# Altium schematic symbol library TitansLib.SchLib: 462 symbols (part 22 of 24)
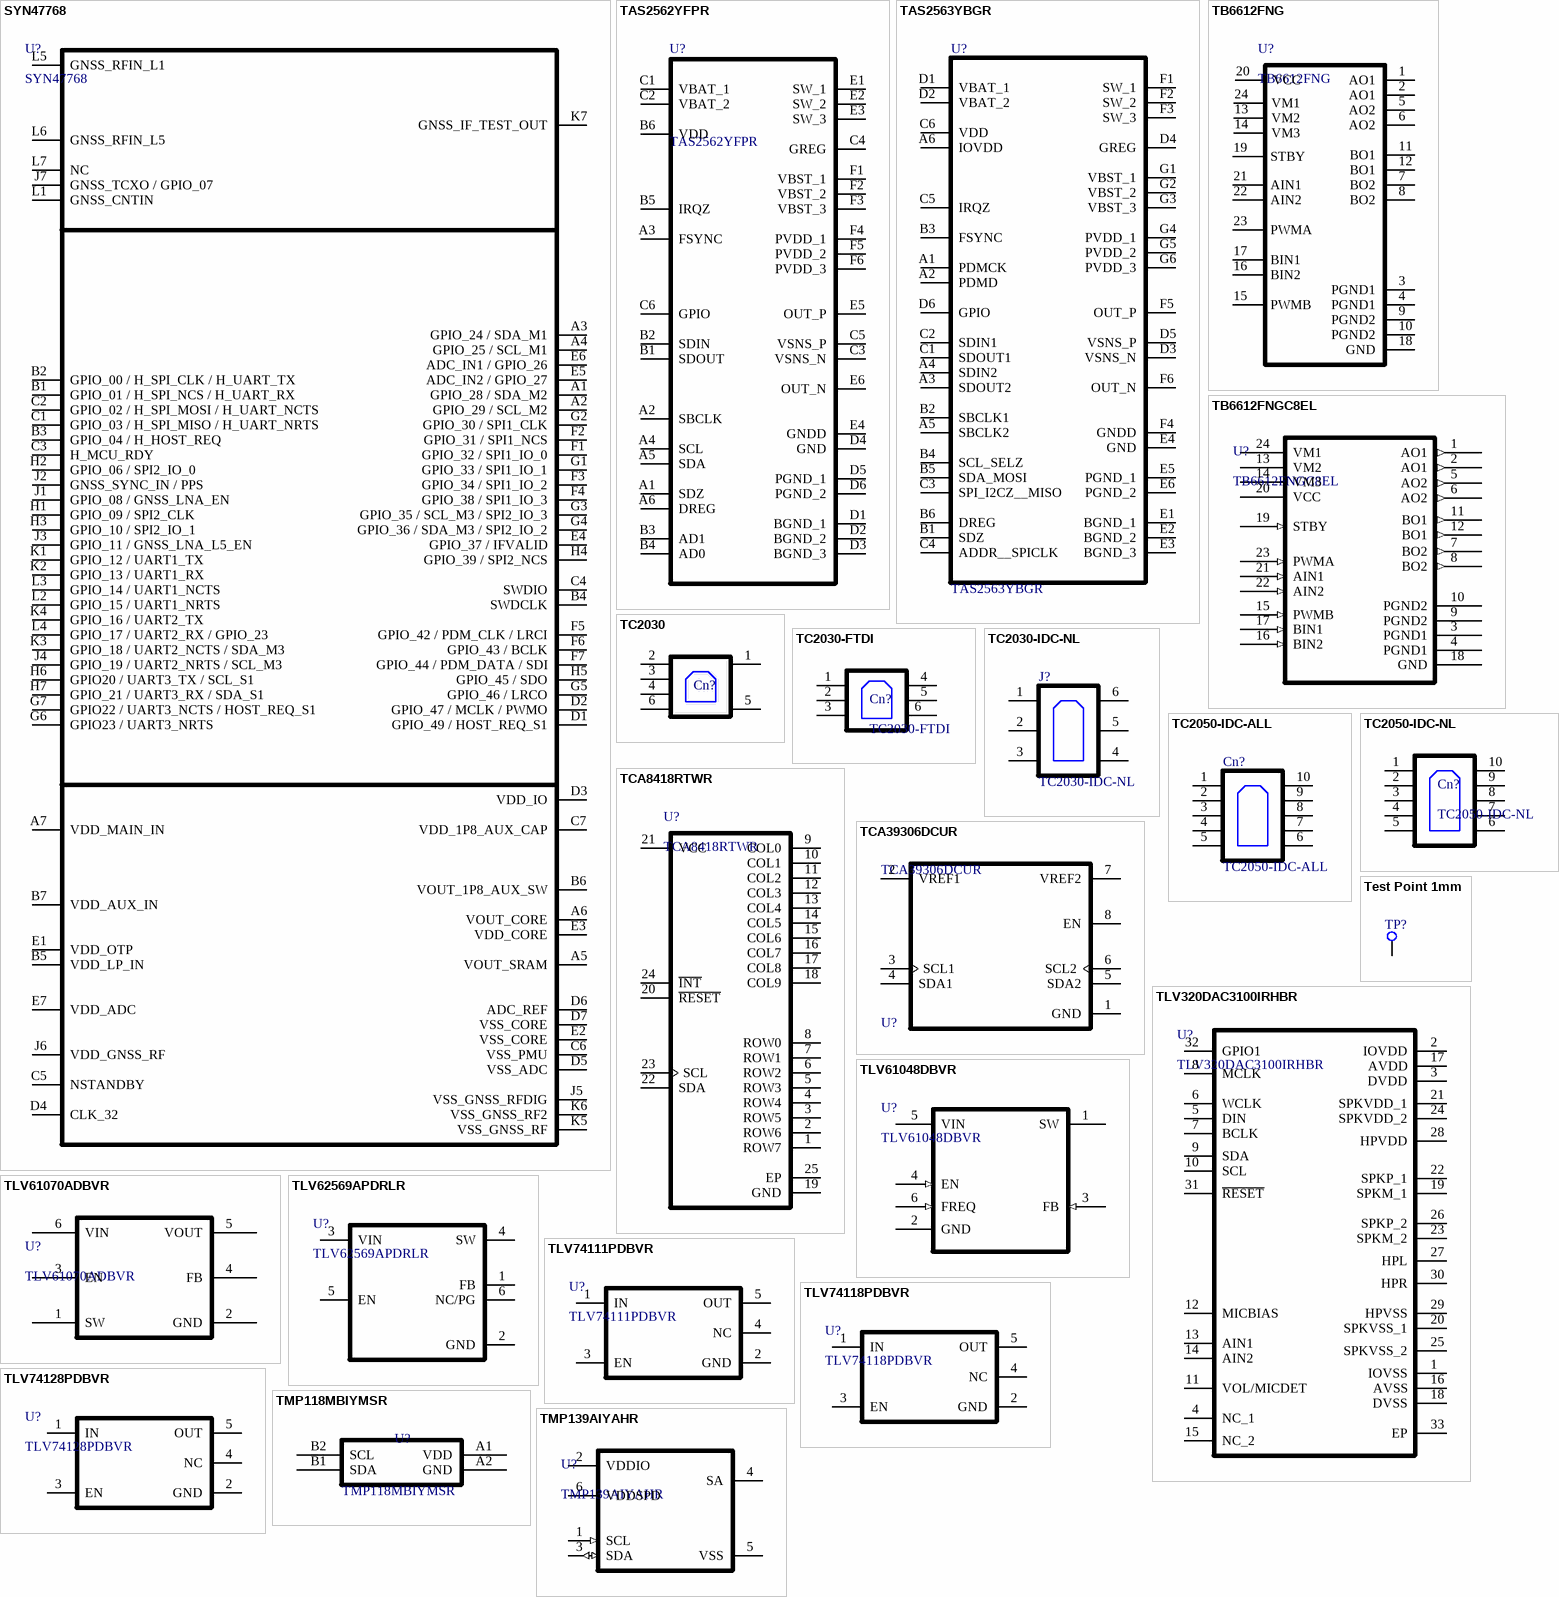
[diagram p38: symbols SYN47768 to TMP139AIYAHR]

## TCA8418RTWR
designator U?
I2C Controlled Keypad Scan IC Serial Interface 24-Pin WQFN EP T/R; Manufacturer: Texas Instruments; Manufacturer Lifecycle Status: ACTIVE; Max Supply Voltage: 3.6V; Min Supply Voltage: 1.65V; Number of Outputs: 18; Supplier: LCSC; Supplier Part Number: C138713; Manufacturer Part Number: TCA8418RTWR; RoHS: Compliant; Category: Integrated Circuits (ICs); Stock: 3191; Pricing: 1=4.4453, 1=0.5291, 1=4.8527, 1=0.6081, 10=3.5432, 10=0.4217, 10=3.868, 10=0.4847, 30=3.0914, 30=0.368, 30=3.3748, 30=0.4229, 100=2.6404, 100=0.3143, 100=2.8824, 100=0.3612, 500=2.3699, 500=0.2821, 500=2.5872, 500=0.3242, 1000=2.234, 1000=0.2659, 1000=2.4387, 1000=0.3056 (CNY); Case/Package: QFN; Contact Plating: Gold; Height: 800µm; Lead Free: Lead Free; Length: 4mm; Lifecycle Status: Production; Max Operating Temperature: 85°C; Min Operating Temperature: -40°C; Pins: 24; Radiation Hardening: No; REACH SVHC: No; Schedule B: 8542390000, 8542390000|8542390000|8542390000|8542390000|8542390000|8542390000|8542390000|8542390000|8542390000|8542390000|8542390000|8542390000|8542390000|8542390000|8542390000|8542390000|8542390000|8542390000|8542390000|8542390000|8542390000|8542390000|8542390000|85; Thickness: 750µm; Type: Integrated Circuit (IC); Width: 4mm; ComponentLink1URL: https://sigma.octopart.com:443/158979639/technical_drawing/Texas-Instruments-TCA8418RTWR.pdf?src-supplier=Texas+Instruments; ComponentLink1Description: https://sigma.octopart.com:443/158979639/technical_drawing/Texas-Instruments-TCA8418RTWR.pdf?src-supplier=Texas+Instruments; ComponentLink3URL: https://octopart.com:443/opatz8j6/c1?t=EcD7_okiRZCYdfQoNxmFteUZDfucer_bbg7ol_h20rBjszXq_UemeR6uGbVFkzhWzI6kXSRL7jiz40zViixA5-m9PLasHY9x8k5UkQzA0iNNHTRXmsO3ZNkl39JV6MUJ5eN-euLJQtJZYtYxv3gE3oAXgN1d2Ivh9afVwIi0hZhH6AMkodeW93IkeIXrn-za-eW0mY1gfijJ_Hvn0OWDctm1iTdMaOYqHvWfDBef945uSeGiabqk1K8LCJ9e5Wfu1WH9AgrkxxzX-U_vZos7pv6_NimNvg_RdgsATdh6EWZIv4e6txISCNLEWGjfFSjBj262rFzGWdnWyVcGz8FscWxpJ_HPUSduW7JGqQzLqCDbUu7LQSUN_TYrM0f8_kmiDvw8CME&src-supplier=Texas+Instruments; ComponentLink3Description: https://octopart.com:443/opatz8j6/c1?t=EcD7_okiRZCYdfQoNxmFteUZDfucer_bbg7ol_h20rBjszXq_UemeR6uGbVFkzhWzI6kXSRL7jiz40zViixA5-m9PLasHY9x8k5UkQzA0iNNHTRXmsO3ZNkl39JV6MUJ5eN-euLJQtJZYtYxv3gE3oAXgN1d2Ivh9afVwIi0hZhH6AMkodeW93IkeIXrn-za-eW0mY1gfijJ_Hvn0OWDctm1iTdMaOYqHvWfDBef945uSeGiabqk1K8LCJ9e5Wfu1WH9AgrkxxzX-U_vZos7pv6_NimNvg_RdgsATdh6EWZIv4e6txISCNLEWGjfFSjBj262rFzGWdnWyVcGz8FscWxpJ_HPUSduW7JGqQzLqCDbUu7LQSUN_TYrM0f8_kmiDvw8CME&src-supplier=Texas+Instruments; ComponentLink4URL: https://datasheet.octopart.com:443/TCA8418RTWR-Texas-Instruments-datasheet-26769754.pdf?src-supplier=Texas+Instruments; ComponentLink4Description: https://datasheet.octopart.com:443/TCA8418RTWR-Texas-Instruments-datasheet-26769754.pdf?src-supplier=Texas+Instruments; ComponentLink5URL: https://datasheet.octopart.com:443/TCA8418RTWR-Texas-Instruments-datasheet-10318952.pdf?src-supplier=Texas+Instruments; ComponentLink5Description: https://datasheet.octopart.com:443/TCA8418RTWR-Texas-Instruments-datasheet-10318952.pdf?src-supplier=Texas+Instruments; ComponentLink6URL: https://sigma.octopart.com:443/49250758/technical_drawing/Texas-Instruments-TCA8418RTWR.pdf?src-supplier=Texas+Instruments; ComponentLink6Description: https://sigma.octopart.com:443/49250758/technical_drawing/Texas-Instruments-TCA8418RTWR.pdf?src-supplier=Texas+Instruments; ComponentLink7URL: https://datasheet.octopart.com:443/TCA8418RTWR-Texas-Instruments-datasheet-27842577.pdf?src-supplier=Farnell; ComponentLink7Description: https://datasheet.octopart.com:443/TCA8418RTWR-Texas-Instruments-datasheet-27842577.pdf?src-supplier=Farnell; ComponentLink8URL: https://datasheet.octopart.com:443/TCA8418RTWR-Texas-Instruments-datasheet-16079866.pdf?src-supplier=element14+APAC; ComponentLink8Description: https://datasheet.octopart.com:443/TCA8418RTWR-Texas-Instruments-datasheet-16079866.pdf?src-supplier=element14+APAC; ComponentLink9URL: https://datasheet.octopart.com:443/TCA8418RTWR-Texas-Instruments-datasheet-62088921.pdf?src-supplier=element14+APAC; ComponentLink9Description: https://datasheet.octopart.com:443/TCA8418RTWR-Texas-Instruments-datasheet-62088921.pdf?src-supplier=element14+APAC; ComponentLink10URL: https://datasheet.octopart.com:443/TCA8418RTWR-Texas-Instruments-datasheet-164418179.pdf?src-supplier=SHENGYU+ELECTRONICS; ComponentLink10Description: https://datasheet.octopart.com:443/TCA8418RTWR-Texas-Instruments-datasheet-164418179.pdf?src-supplier=SHENGYU+ELECTRONICS; ComponentLink11URL: https://datasheet.octopart.com:443/TCA8418RTWR-Texas-Instruments-datasheet-165804537.pdf?src-supplier=LCSC; ComponentLink11Description: https://datasheet.octopart.com:443/TCA8418RTWR-Texas-Instruments-datasheet-165804537.pdf?src-supplier=LCSC; ComponentLink12URL: https://datasheet.octopart.com:443/TCA8418RTWR-Texas-Instruments-datasheet-159117508.pdf?src-supplier=LCSC; ComponentLink12Description: https://datasheet.octopart.com:443/TCA8418RTWR-Texas-Instruments-datasheet-159117508.pdf?src-supplier=LCSC; ComponentLink13URL: https://datasheet.octopart.com:443/TCA8418RTWR-Texas-Instruments-datasheet-137316104.pdf?src-supplier=Future+Electronics; ComponentLink13Description: https://datasheet.octopart.com:443/TCA8418RTWR-Texas-Instruments-datasheet-137316104.pdf?src-supplier=Future+Electronics; ComponentLink14URL: https://datasheet.octopart.com:443/TCA8418RTWR-Texas-Instruments-datasheet-14134936.pdf?src-supplier=iiiC; ComponentLink14Description: https://datasheet.octopart.com:443/TCA8418RTWR-Texas-Instruments-datasheet-14134936.pdf?src-supplier=iiiC; ComponentLink15URL: https://datasheet.octopart.com:443/TCA8418RTWR-Texas-Instruments-datasheet-11968181.pdf?src-supplier=Arrow+Electronics; ComponentLink15Description: https://datasheet.octopart.com:443/TCA8418RTWR-Texas-Instruments-datasheet-11968181.pdf?src-supplier=Arrow+Electronics; ComponentLink16URL: http://sigma.octopart.com:80/conflict_mineral_statement/Texas-Instruments-company-63.pdf?src-supplier=Compliance+Statements; ComponentLink16Description: http://sigma.octopart.com:80/conflict_mineral_statement/Texas-Instruments-company-63.pdf?src-supplier=Compliance+Statements; ComponentLink17URL: http://sigma.octopart.com:80/reach_statement/Texas-Instruments-company-64.pdf?src-supplier=Compliance+Statements; ComponentLink17Description: http://sigma.octopart.com:80/reach_statement/Texas-Instruments-company-64.pdf?src-supplier=Compliance+Statements
footprint TCA8418RTWR (QFN, 24-Leads, Body 4x4mm, Pitch 0.5mm, Thermal Pad 2.45x2.45mm)
pins: 1 ROW7 "GPIO or row 7 in keypad matrix", 2 ROW6 "GPIO or row 6 in keypad matrix", 3 ROW5 "GPIO or row 5 in keypad matrix", 4 ROW4 "GPIO or row 4 in keypad matrix", 5 ROW3 "GPIO or row 3 in keypad matrix", 6 ROW2 "GPIO or row 2 in keypad matrix", 7 ROW1 "GPIO or row 1 in keypad matrix", 8 ROW0 "GPIO or row 0 in keypad matrix", 9 COL0 "GPIO or column 0 in keypad matrix", 10 COL1 "GPIO or column 1 in keypad matrix", 11 COL2 "GPIO or column 2 in keypad matrix", 12 COL3 "GPIO or column 3 in keypad matrix", 13 COL4 "GPIO or column 4 in keypad matrix", 14 COL5 "GPIO or column 5 in keypad matrix", 15 COL6 "GPIO or column 6 in keypad matrix", 16 COL7 "GPIO or column 7 in keypad matrix", 17 COL8 "GPIO or column 8 in keypad matrix", 18 COL9 "GPIO or column 9 in keypad matrix", 19 GND "Ground", 20 ~{RESET} "Active-low reset input. Connect to VCC through a pullup resistor, if no active connection is used.", 21 VCC (power) "Supply voltage of 1.65 V to 3.6 V", 22 SDA "Serial data bus. Connect to VCC through a pullup resistor.", 23 SCL "Serial clock bus. Connect to VCC through a pullup resistor.", 24 ~{INT} "Active-low interrupt output. Open drain structure. Connect to VCC through a pullup resistor.", 25 EP "Exposed Pad"

## TCA39306DCUR
designator U?
FM+ I²C bus and SMBus voltage translator 8-VSSOP -40 to 125; Manufacturer: Texas Instruments; Manufacturer Lifecycle Status: ACTIVE; Frequency: 12.5MHz; Max Junction Temperature (Tj): 150°C; Number of Circuits: 1; Supplier: DigiKey; Supplier Part Number: 296-TCA39306DCURCT-ND; Manufacturer Part Number: TCA39306DCUR; RoHS: Compliant; Category: Voltage Level Shifters; Stock: 10045; Pricing: 1=1.16, 10=0.838, 25=0.758, 100=0.6698, 250=0.62772, 500=0.60236, 1000=0.58146 (USD); Ambient Temperature Range High: 125°C; Case/Package: VSSOP; Height: 900µm; Length: 2.3mm; Lifecycle Status: Production; Max Operating Temperature: 125°C; Min Operating Temperature: -40°C; Pins: 8; Thickness: 850µm; Width: 2mm; ComponentLink1URL: https://sigma.octopart.com:443/167215082/technical_drawing/Texas-Instruments-TCA39306DCUR.pdf?src-supplier=Texas+Instruments; ComponentLink1Description: https://sigma.octopart.com:443/167215082/technical_drawing/Texas-Instruments-TCA39306DCUR.pdf?src-supplier=Texas+Instruments; ComponentLink2URL: https://octopart.com:443/opatz8j6/c1?t=cuJHrWyqA9sXS9OeNBSMVjSZzipewaq_cO1UrxPFxNO9cUi_-3un0wkPJOiVlTn0n0u9VaZOG4aIVrWFOBD3JBTYNH09CnZnJoz02kLV-xwghmLScma3YhGrYa6r7W6HIdqFe6qI44CFTqODpuIKVbTSnKNLxfZmxecu9alQwbm-g96gBpM-ONZMrwHJcp5pkJLENRrjnfRb0QudlzUz4HvFZTwojDYBifx1Jd9V_MtoCkg8kd4tmVesq4SZrk172Lm7SLBO1SsH0PeV2ElZmF9rzKgIFov1hctEUXdHHfKgRXWyp0o4L0ODSekwyi9oVhOnNB07cdPM60V0mj9dIPXTXXasNTJpsEDKALNiRwALk6lsUelmlAnO48yEFuf3CvYAKs67mg&src-supplier=Texas+Instruments; ComponentLink2Description: https://octopart.com:443/opatz8j6/c1?t=cuJHrWyqA9sXS9OeNBSMVjSZzipewaq_cO1UrxPFxNO9cUi_-3un0wkPJOiVlTn0n0u9VaZOG4aIVrWFOBD3JBTYNH09CnZnJoz02kLV-xwghmLScma3YhGrYa6r7W6HIdqFe6qI44CFTqODpuIKVbTSnKNLxfZmxecu9alQwbm-g96gBpM-ONZMrwHJcp5pkJLENRrjnfRb0QudlzUz4HvFZTwojDYBifx1Jd9V_MtoCkg8kd4tmVesq4SZrk172Lm7SLBO1SsH0PeV2ElZmF9rzKgIFov1hctEUXdHHfKgRXWyp0o4L0ODSekwyi9oVhOnNB07cdPM60V0mj9dIPXTXXasNTJpsEDKALNiRwALk6lsUelmlAnO48yEFuf3CvYAKs67mg&src-supplier=Texas+Instruments; ComponentLink3URL: https://datasheet.octopart.com:443/TCA39306DCUR-Texas-Instruments-datasheet-158985309.pdf?src-supplier=Upverter; ComponentLink3Description: https://datasheet.octopart.com:443/TCA39306DCUR-Texas-Instruments-datasheet-158985309.pdf?src-supplier=Upverter; ComponentLink4URL: https://datasheet.octopart.com:443/TCA39306DCUR-Texas-Instruments-datasheet-165811859.pdf?src-supplier=Augswan; ComponentLink4Description: https://datasheet.octopart.com:443/TCA39306DCUR-Texas-Instruments-datasheet-165811859.pdf?src-supplier=Augswan; ComponentLink5URL: https://datasheet.octopart.com:443/TCA39306DCUR-Texas-Instruments-datasheet-166167673.pdf?src-supplier=LCSC; ComponentLink5Description: https://datasheet.octopart.com:443/TCA39306DCUR-Texas-Instruments-datasheet-166167673.pdf?src-supplier=LCSC; ComponentLink6URL: http://sigma.octopart.com:80/reach_statement/Texas-Instruments-company-64.pdf?src-supplier=Compliance+Statements; ComponentLink6Description: http://sigma.octopart.com:80/reach_statement/Texas-Instruments-company-64.pdf?src-supplier=Compliance+Statements; ComponentLink7URL: http://sigma.octopart.com:80/conflict_mineral_statement/Texas-Instruments-company-63.pdf?src-supplier=Compliance+Statements; ComponentLink7Description: http://sigma.octopart.com:80/conflict_mineral_statement/Texas-Instruments-company-63.pdf?src-supplier=Compliance+Statements; Supplier 1: DigiKey; Supplier Part Number 1: 296-TCA39306DCURCT-ND; Supplier 2: DigiKey; Supplier Part Number 2: 296-TCA39306DCURTR-ND; Supplier 3: Mouser; Supplier Part Number 3: 595-TCA39306DCUR
footprint TSSOP50P310X90-8N (TSSOP, 8-Leads, Body 2.00x2.30mm, Pitch 0.50mm, IPC Medium Density)
pins: 1 GND, 2 VREF1, 3 SCL1, 4 SDA1, 5 SDA2, 6 SCL2, 7 VREF2, 8 EN

## Test Point 1mm
designator TP?, comment Test point  (value not drawn)  (no BOM)
Test Point Round SMD D=1mm; Type: Test
footprint TP 1mm
pins: 1

## TLV320DAC3100IRHBR
designator U?
Low-Power Stereo Audio DAC With Audio Processing / and Mono Class-D Speaker Amplifier; Manufacturer_Name: Texas Instruments; Datasheet Link: http://www.ti.com/lit/gpn/TLV320DAC3100; Height: 1mm; Manufacturer Part Number: TLV320DAC3100IRHBR; Mouser Part Number: 595-V320DAC3100IRHBR; Mouser Price/Stock: https://www.mouser.co.uk/ProductDetail/Texas-Instruments/TLV320DAC3100IRHBT?qs=3cDLNOBdYaV9lK%252Bp3rNk4A%3D%3D; Arrow Part Number: TLV320DAC3100IRHBR; Arrow Price/Stock: https://www.arrow.com/en/products/tlv320dac3100irhbt/texas-instruments?utm_currency=USD&region=europe; Supplier 1: DigiKey; Supplier Part Number 1: 296-27216-1-ND; Supplier 2: DigiKey; Supplier Part Number 2: 296-27216-6-ND; Supplier 3: Mouser; Supplier Part Number 3: 595-V320DAC3100IRHBR; Supplier 4: LCSC; Supplier Part Number 4: C179677
footprint QFN50P500X500X100-33N-D
pins: 1 IOVSS, 2 IOVDD, 3 DVDD, 4 NC_1, 5 DIN, 6 WCLK, 7 BCLK, 8 MCLK, 9 SDA, 10 SCL, 11 VOL/MICDET, 12 MICBIAS, 13 AIN1, 14 AIN2, 15 NC_2, 16 AVSS, 17 AVDD, 18 DVSS, 19 SPKM_1, 20 SPKVSS_1, 21 SPKVDD_1, 22 SPKP_1, 23 SPKM_2, 24 SPKVDD_2, 25 SPKVSS_2, 26 SPKP_2, 27 HPL, 28 HPVDD, 29 HPVSS, 30 HPR, 31 ~{RESET}, 32 GPIO1, 33 EP

## TLV61048DBVR
designator U?
Output Voltage Non-synchronous Boost Converterin SOT-23 package; Manufacturer: Texas Instruments; Supplier: Mouser; Supplier Part Number: 595-TLV61048DBVR; Manufacturer Part Number: TLV61048DBVR; RoHS: No; Category: Voltage Regulators - Switching; Stock: 8348; Pricing: 1=0.75, 100 = 0.429, 1000=0.37 (USD); RoHS Compliant: Yes; Supplier 1: DigiKey; Supplier Part Number 1: 296-TLV61048DBVRCT-ND; Supplier 2: DigiKey; Supplier Part Number 2: 296-TLV61048DBVRDKR-ND; Supplier 3: Mouser; Supplier Part Number 3: 595-TLV61048DBVR; Supplier 4: LCSC; Supplier Part Number 4: C2861467
footprint SOT95P275X120-6N (SOT23, 6-Leads, Body 2.90x2.75mm, Pitch 0.95mm, IPC Medium Density)
pins: 1 SW (power), 2 GND (power), 3 FB (in), 4 EN (in), 5 VIN (power), 6 FREQ (in)

## TLV61070ADBVR
designator U?
5-V 2-A boost converter with 0.5-V minimum input voltage 6-SOT-23 -40 to 125; Manufacturer: Texas Instruments; Manufacturer Lifecycle Status: ACTIVE; Number of Channels: 1; Supplier: Arrow Electronics; Supplier Part Number: TLV61070ADBVR; Manufacturer Part Number: TLV61070ADBVR; RoHS: Compliant; Category: Voltage Regulators - Switching; Stock: 1413; Pricing: 1=0,4566, 10=0,3414, 25=0,3062, 100=0,2723, 250=0,2413 (USD); Case/Package: SOT-23; Height: 0m; Length: 2.9mm; Lifecycle Status: Production; Pins: 6; Thickness: 1.2mm; Topology: Boost; Width: 1.6mm; ComponentLink1URL: https://sigma.octopart.com:443/182282880/technical_drawing/Texas-Instruments-TLV61070ADBVR.pdf?src-supplier=Texas+Instruments; ComponentLink1Description: https://sigma.octopart.com:443/182282880/technical_drawing/Texas-Instruments-TLV61070ADBVR.pdf?src-supplier=Texas+Instruments; ComponentLink2URL: https://octopart.com:443/opatz8j6/c1?t=vHjRs84vzqiSD-tO6hMe9JhRTtT3upVDrXCv1wRcZIX6-7MQXDOW7AG681yewBVCNdEFebKssGFTHK-ncVD0g2XIMRfL_MIVj06RM02JHrtUOpniz4ICHh0Z4WKezMRMf0_iOaLkv8UWi4INBJrk-ojIQt6lsV0-UknSvJIBrNevxJaED7KWgn0v9QfrXbVw43Y6droW4axSWNMxhTVfsfd8O4QufXQBbcD7lTo5UdJiQbYbFQVnTcm0nTYllJlextykO5sitRjbvxZTgnwaTVTtXFDEYtQDQ1gxq-RtglKrE_3x7ejlRaBBQqdVbyKumwfqTsNKFt7lXsVPSSWma13VCdsNiNOAl5P2Tp7zQ0DFPACOXbjY72TQtWZtrdD-wOQvHaPHRA&src-supplier=Texas+Instruments; ComponentLink2Description: https://octopart.com:443/opatz8j6/c1?t=vHjRs84vzqiSD-tO6hMe9JhRTtT3upVDrXCv1wRcZIX6-7MQXDOW7AG681yewBVCNdEFebKssGFTHK-ncVD0g2XIMRfL_MIVj06RM02JHrtUOpniz4ICHh0Z4WKezMRMf0_iOaLkv8UWi4INBJrk-ojIQt6lsV0-UknSvJIBrNevxJaED7KWgn0v9QfrXbVw43Y6droW4axSWNMxhTVfsfd8O4QufXQBbcD7lTo5UdJiQbYbFQVnTcm0nTYllJlextykO5sitRjbvxZTgnwaTVTtXFDEYtQDQ1gxq-RtglKrE_3x7ejlRaBBQqdVbyKumwfqTsNKFt7lXsVPSSWma13VCdsNiNOAl5P2Tp7zQ0DFPACOXbjY72TQtWZtrdD-wOQvHaPHRA&src-supplier=Texas+Instruments; ComponentLink3URL: https://sigma.octopart.com:443/179253514/technical_drawing/Texas-Instruments-TLV61070ADBVR.pdf?src-supplier=Texas+Instruments; ComponentLink3Description: https://sigma.octopart.com:443/179253514/technical_drawing/Texas-Instruments-TLV61070ADBVR.pdf?src-supplier=Texas+Instruments; ComponentLink4URL: https://sigma.octopart.com:443/177332312/technical_drawing/Texas-Instruments-TLV61070ADBVR.pdf?src-supplier=Texas+Instruments; ComponentLink4Description: https://sigma.octopart.com:443/177332312/technical_drawing/Texas-Instruments-TLV61070ADBVR.pdf?src-supplier=Texas+Instruments; ComponentLink5URL: https://sigma.octopart.com:443/175570407/technical_drawing/Texas-Instruments-TLV61070ADBVR.pdf?src-supplier=Texas+Instruments; ComponentLink5Description: https://sigma.octopart.com:443/175570407/technical_drawing/Texas-Instruments-TLV61070ADBVR.pdf?src-supplier=Texas+Instruments; ComponentLink6URL: https://sigma.octopart.com:443/154719501/technical_drawing/Texas-Instruments-TLV61070ADBVR.pdf?src-supplier=Texas+Instruments; ComponentLink6Description: https://sigma.octopart.com:443/154719501/technical_drawing/Texas-Instruments-TLV61070ADBVR.pdf?src-supplier=Texas+Instruments; ComponentLink7URL: http://sigma.octopart.com:80/reach_statement/Texas-Instruments-company-64.pdf?src-supplier=Compliance+Statements; ComponentLink7Description: http://sigma.octopart.com:80/reach_statement/Texas-Instruments-company-64.pdf?src-supplier=Compliance+Statements; ComponentLink8URL: http://sigma.octopart.com:80/conflict_mineral_statement/Texas-Instruments-company-63.pdf?src-supplier=Compliance+Statements; ComponentLink8Description: http://sigma.octopart.com:80/conflict_mineral_statement/Texas-Instruments-company-63.pdf?src-supplier=Compliance+Statements; Supplier 1: DigiKey; Supplier Part Number 1: 296-TLV61070ADBVRCT-ND; Supplier 2: DigiKey; Supplier Part Number 2: 296-TLV61070ADBVRDKR-ND; Supplier 3: Mouser; Supplier Part Number 3: 595-TLV61070ADBVR
footprint TLV61070ADBVR (SOT23, 6-Leads, Body 2,90x2,80mm, Pitch 0,95mm, IPC Low Density)
pins: 1 SW, 2 GND, 3 EN, 4 FB, 5 VOUT, 6 VIN

## TLV62569APDRLR
designator U?
Switching Regulator, 2A, 1500kHz Switching Freq-Max, PDSO6; Manufacturer: Texas Instruments; Supplier: Mouser; Supplier Part Number: 595-TLV62569APDRLR; Manufacturer Part Number: TLV62569APDRLR; RoHS: Yes; Category: Voltage Regulators - Switching; Stock: 34810; Pricing: 1=0.21, 10=0.142, 50=0.126, 100=0.108, 1000=0.084, 10000=0.08 (USD); Terminal Finish: Tin; JESD-609 Code: e3; Throw Configuration: SWITCHING REGULATOR; Moisture Sensitivity Level: 1; Peak Reflow Temperature (Cel): 260°C; Reach SVHC Compliant: Yes; RoHS Compliant: Yes; ComponentLink1URL: https://www.ti.com:443/lit/ds/symlink/tlv62568a.pdf?src-supplier=IHS+Markit; ComponentLink1Description: https://www.ti.com:443/lit/ds/symlink/tlv62568a.pdf?src-supplier=IHS+Markit; ComponentLink2URL: http://www.ti.com/lit/ds/symlink/tlv62568a.pdf?src-supplier=Digikey; ComponentLink2Description: http://www.ti.com/lit/ds/symlink/tlv62568a.pdf?src-supplier=Digikey; ComponentLink3URL: http://www.ti.com/general/docs/suppproductinfo.tsp?distId=10&amp;gotoUrl=http%3A%2F%2Fwww.ti.com%2Flit%2Fgpn%2Ftlv62568a&src-supplier=Digikey; ComponentLink3Description: http://www.ti.com/general/docs/suppproductinfo.tsp?distId=10&amp;gotoUrl=http%3A%2F%2Fwww.ti.com%2Flit%2Fgpn%2Ftlv62568a&src-supplier=Digikey; Supplier 1: Digikey; Supplier Part Number 1: 296-51693-1-ND; Supplier 2: Mouser; Supplier Part Number 2: 595-TLV62569APDRLR
footprint SOT50P160X60-6N (SOT23, 6-Leads, Body 1.60x1.60mm, Pitch 0.50mm, IPC Medium Density)
pins: 1 FB, 2 GND, 3 VIN, 4 SW, 5 EN, 6 NC/PG

## TLV74111PDBVR
designator U?
150-mA low-dropout (LDO) voltage regulator with active output discharge and enable 5-SOT-23 -40 to 125; Manufacturer: Texas Instruments; Supplier: DigiKey; Supplier Part Number: 296-51743-1-ND; Manufacturer Part Number: TLV74111PDBVR; RoHS: Compliant; Category: LDO Voltage Regulators; Stock: 14068; Pricing: 1=0.11, 10=0.074, 25=0.0648, 100=0.0546, 250=0.04972, 500=0.04674, 1000=0.0443 (USD); Case/Package: SOT-23; Height: 1.45mm; Length: 2.9mm; Lifecycle Status: Production; Manufacturer Lifecycle Status: ACTIVE; Max Operating Temperature: 125°C; Min Operating Temperature: -40°C; Pins: 5; Schedule B: 8542390000; Thickness: 1.2mm; Width: 1.6mm; ComponentLink1URL: https://sigma.octopart.com:443/177332311/technical_drawing/Texas-Instruments-TLV74111PDBVR.pdf?src-supplier=Texas+Instruments; ComponentLink1Description: https://sigma.octopart.com:443/177332311/technical_drawing/Texas-Instruments-TLV74111PDBVR.pdf?src-supplier=Texas+Instruments; ComponentLink2URL: https://octopart.com:443/opatz8j6/c1?t=BgYGKxNO4uAk70t2o9PA6mQ6vwTlRIT8wfeK4DTGbNF3gqAnuH8pyjo1Zf9aREQKDqWjg_n9s37NPhVM2hQqLkZClATMew16GI07lX0rKNpMfTT5-QNithl_aq5wrjDkd4svBl29YXFc6hdL8nD5dxnjT5yA9TGhVKOcfrLVkJt_qvxn7pkUojwB8qA1pAwmCzovIwuXLWybtGjtXbziZIhUiYxnhkke7qNWpkJzhH-6lb1Y10wwkySMkKyrc7_InYtlR2sy7JDnBczxx8piaphExRoUMX1ngJ9uuEHZnRAqohnGt1zaadu1c3kw9Okjymddr9Tg9x2bwI6I_tj0-9g8gq5lP_2UL4ZivigmCGpCrWLrslF1u9YWUR6MsNea31aTAw&src-supplier=Texas+Instruments; ComponentLink2Description: https://octopart.com:443/opatz8j6/c1?t=BgYGKxNO4uAk70t2o9PA6mQ6vwTlRIT8wfeK4DTGbNF3gqAnuH8pyjo1Zf9aREQKDqWjg_n9s37NPhVM2hQqLkZClATMew16GI07lX0rKNpMfTT5-QNithl_aq5wrjDkd4svBl29YXFc6hdL8nD5dxnjT5yA9TGhVKOcfrLVkJt_qvxn7pkUojwB8qA1pAwmCzovIwuXLWybtGjtXbziZIhUiYxnhkke7qNWpkJzhH-6lb1Y10wwkySMkKyrc7_InYtlR2sy7JDnBczxx8piaphExRoUMX1ngJ9uuEHZnRAqohnGt1zaadu1c3kw9Okjymddr9Tg9x2bwI6I_tj0-9g8gq5lP_2UL4ZivigmCGpCrWLrslF1u9YWUR6MsNea31aTAw&src-supplier=Texas+Instruments; ComponentLink3URL: https://sigma.octopart.com:443/175570406/technical_drawing/Texas-Instruments-TLV74111PDBVR.pdf?src-supplier=Texas+Instruments; ComponentLink3Description: https://sigma.octopart.com:443/175570406/technical_drawing/Texas-Instruments-TLV74111PDBVR.pdf?src-supplier=Texas+Instruments; ComponentLink4URL: https://sigma.octopart.com:443/169406034/technical_drawing/Texas-Instruments-TLV74111PDBVR.pdf?src-supplier=Texas+Instruments; ComponentLink4Description: https://sigma.octopart.com:443/169406034/technical_drawing/Texas-Instruments-TLV74111PDBVR.pdf?src-supplier=Texas+Instruments; ComponentLink5URL: https://sigma.octopart.com:443/155939316/technical_drawing/Texas-Instruments-TLV74111PDBVR.pdf?src-supplier=Texas+Instruments; ComponentLink5Description: https://sigma.octopart.com:443/155939316/technical_drawing/Texas-Instruments-TLV74111PDBVR.pdf?src-supplier=Texas+Instruments; ComponentLink6URL: https://sigma.octopart.com:443/102331370/technical_drawing/Texas-Instruments-TLV74111PDBVR.pdf?src-supplier=Texas+Instruments; ComponentLink6Description: https://sigma.octopart.com:443/102331370/technical_drawing/Texas-Instruments-TLV74111PDBVR.pdf?src-supplier=Texas+Instruments; ComponentLink7URL: https://sigma.octopart.com:443/49249325/technical_drawing/Texas-Instruments-TLV74111PDBVR.pdf?src-supplier=Texas+Instruments; ComponentLink7Description: https://sigma.octopart.com:443/49249325/technical_drawing/Texas-Instruments-TLV74111PDBVR.pdf?src-supplier=Texas+Instruments; ComponentLink8URL: https://datasheet.octopart.com:443/TLV74111PDBVR-Texas-Instruments-datasheet-148780593.pdf?src-supplier=Augswan; ComponentLink8Description: https://datasheet.octopart.com:443/TLV74111PDBVR-Texas-Instruments-datasheet-148780593.pdf?src-supplier=Augswan; ComponentLink9URL: http://sigma.octopart.com:80/reach_statement/Texas-Instruments-company-64.pdf?src-supplier=Compliance+Statements; ComponentLink9Description: http://sigma.octopart.com:80/reach_statement/Texas-Instruments-company-64.pdf?src-supplier=Compliance+Statements; ComponentLink10URL: http://sigma.octopart.com:80/conflict_mineral_statement/Texas-Instruments-company-63.pdf?src-supplier=Compliance+Statements; ComponentLink10Description: http://sigma.octopart.com:80/conflict_mineral_statement/Texas-Instruments-company-63.pdf?src-supplier=Compliance+Statements; Supplier 1: DigiKey; Supplier Part Number 1: 296-51743-1-ND; Supplier 2: DigiKey; Supplier Part Number 2: 296-51743-2-ND; Supplier 3: Mouser; Supplier Part Number 3: 595-TLV74111PDBVR
footprint SOT95P280X145-5N (SOT23, 5-Leads, Body 2.90x2.80mm, Pitch 0.95mm, IPC Medium Density)
pins: 1 IN, 2 GND, 3 EN, 4 NC, 5 OUT

## TLV74118PDBVR
designator U?
150mA null 1.8V positive 5.5V SOT-23-5 Linear Voltage Regulators (LDO) ROHS; Manufacturer: Texas Instruments; Manufacturer Lifecycle Status: ACTIVE; Accuracy: 1%; Dropout Voltage: 230mV; Max Junction Temperature (Tj): 125°C; Min Supply Voltage: 1.4V; Nominal Supply Current: 50µA; Number of Channels: 1; Supplier: DigiKey; Supplier Part Number: 296-48986-1-ND; Manufacturer Part Number: TLV74118PDBVR; RoHS: Compliant; Category: LDO Voltage Regulators; Stock: 34456; Pricing: 1=0.12, 10=0.082, 25=0.0716, 100=0.0602, 250=0.05484, 500=0.05162, 1000=0.04896 (USD); Case/Package: SOT-23; Height: 1.45mm; Length: 2.9mm; Lifecycle Status: Production; Max Operating Temperature: 125°C; Max Supply Voltage: 5.5V; Min Operating Temperature: -40°C; Number of Outputs: 1; Pins: 5; Output Current: 150mA; Output Voltage: 1.8V; Schedule B: 8542390000, 8542390000|8542390000, 8542390000|8542390000|8542390000, 8542390000|8542390000|8542390000|8542390000; Thickness: 1.2mm; Width: 1.6mm; ComponentLink1URL: https://sigma.octopart.com:443/177332311/technical_drawing/Texas-Instruments-TLV74118PDBVR.pdf?src-supplier=Texas+Instruments; ComponentLink1Description: https://sigma.octopart.com:443/177332311/technical_drawing/Texas-Instruments-TLV74118PDBVR.pdf?src-supplier=Texas+Instruments; ComponentLink2URL: https://octopart.com:443/opatz8j6/c1?t=GHFjmwm-hBsFimlxZNr1Dpgx77D_Vddh5rGLRfvg7lk55-JUa57oLl3WgxdFJjdNvRujLY1e0HDb0cJWH5Ijd15kMwb1ykXnt4sRDG8O6e6TYZCQgDDco6Tb-xaGEXDg9fHOvdm1hzuOT7oI1UoPrEt4TTMAHlsXGanPtJnx6njPc-rk36vBLK9JuRQw1DYtYvrq7rsVUiGPwxbf0W-5W6EbVUmzQ51p8vGENBgzp9mFAtdO0TJdI-4tWac_OT1ZipEQPuS9E3xwfYQxTMho5DMLeBV70NLOLcXTUQ-mGPLMEJVApxQvQnfkSMSUbzb1g5Rm3TyY_fGvViFzSTpdW7ALM6TpPgk67BCW5T2AyvOI9nSnGryl2N7Fqkw868LqZt_-JA&src-supplier=Texas+Instruments; ComponentLink2Description: https://octopart.com:443/opatz8j6/c1?t=GHFjmwm-hBsFimlxZNr1Dpgx77D_Vddh5rGLRfvg7lk55-JUa57oLl3WgxdFJjdNvRujLY1e0HDb0cJWH5Ijd15kMwb1ykXnt4sRDG8O6e6TYZCQgDDco6Tb-xaGEXDg9fHOvdm1hzuOT7oI1UoPrEt4TTMAHlsXGanPtJnx6njPc-rk36vBLK9JuRQw1DYtYvrq7rsVUiGPwxbf0W-5W6EbVUmzQ51p8vGENBgzp9mFAtdO0TJdI-4tWac_OT1ZipEQPuS9E3xwfYQxTMho5DMLeBV70NLOLcXTUQ-mGPLMEJVApxQvQnfkSMSUbzb1g5Rm3TyY_fGvViFzSTpdW7ALM6TpPgk67BCW5T2AyvOI9nSnGryl2N7Fqkw868LqZt_-JA&src-supplier=Texas+Instruments; ComponentLink3URL: https://sigma.octopart.com:443/175570406/technical_drawing/Texas-Instruments-TLV74118PDBVR.pdf?src-supplier=Texas+Instruments; ComponentLink3Description: https://sigma.octopart.com:443/175570406/technical_drawing/Texas-Instruments-TLV74118PDBVR.pdf?src-supplier=Texas+Instruments; ComponentLink4URL: https://sigma.octopart.com:443/169406034/technical_drawing/Texas-Instruments-TLV74118PDBVR.pdf?src-supplier=Texas+Instruments; ComponentLink4Description: https://sigma.octopart.com:443/169406034/technical_drawing/Texas-Instruments-TLV74118PDBVR.pdf?src-supplier=Texas+Instruments; ComponentLink5URL: https://sigma.octopart.com:443/155939316/technical_drawing/Texas-Instruments-TLV74118PDBVR.pdf?src-supplier=Texas+Instruments; ComponentLink5Description: https://sigma.octopart.com:443/155939316/technical_drawing/Texas-Instruments-TLV74118PDBVR.pdf?src-supplier=Texas+Instruments; ComponentLink6URL: https://sigma.octopart.com:443/102331370/technical_drawing/Texas-Instruments-TLV74118PDBVR.pdf?src-supplier=Texas+Instruments; ComponentLink6Description: https://sigma.octopart.com:443/102331370/technical_drawing/Texas-Instruments-TLV74118PDBVR.pdf?src-supplier=Texas+Instruments; ComponentLink7URL: https://sigma.octopart.com:443/49249325/technical_drawing/Texas-Instruments-TLV74118PDBVR.pdf?src-supplier=Texas+Instruments; ComponentLink7Description: https://sigma.octopart.com:443/49249325/technical_drawing/Texas-Instruments-TLV74118PDBVR.pdf?src-supplier=Texas+Instruments; ComponentLink8URL: https://datasheet.octopart.com:443/TLV74118PDBVR-Texas-Instruments-datasheet-150595086.pdf?src-supplier=Upverter; ComponentLink8Description: https://datasheet.octopart.com:443/TLV74118PDBVR-Texas-Instruments-datasheet-150595086.pdf?src-supplier=Upverter; ComponentLink9URL: https://datasheet.octopart.com:443/TLV74118PDBVR-Texas-Instruments-datasheet-148780593.pdf?src-supplier=Augswan; ComponentLink9Description: https://datasheet.octopart.com:443/TLV74118PDBVR-Texas-Instruments-datasheet-148780593.pdf?src-supplier=Augswan; ComponentLink10URL: http://sigma.octopart.com:80/reach_statement/Texas-Instruments-company-64.pdf?src-supplier=Compliance+Statements; ComponentLink10Description: http://sigma.octopart.com:80/reach_statement/Texas-Instruments-company-64.pdf?src-supplier=Compliance+Statements; ComponentLink11URL: http://sigma.octopart.com:80/conflict_mineral_statement/Texas-Instruments-company-63.pdf?src-supplier=Compliance+Statements; ComponentLink11Description: http://sigma.octopart.com:80/conflict_mineral_statement/Texas-Instruments-company-63.pdf?src-supplier=Compliance+Statements; Supplier 1: DigiKey; Supplier Part Number 1: 296-48986-1-ND; Supplier 2: DigiKey; Supplier Part Number 2: 296-48986-2-ND; Supplier 3: Mouser; Supplier Part Number 3: 595-TLV74118PDBVR
footprint SOT95P280X145-5N (SOT23, 5-Leads, Body 2.90x2.80mm, Pitch 0.95mm, IPC Medium Density)
pins: 1 IN, 2 GND, 3 EN, 4 NC, 5 OUT

## TLV74128PDBVR
designator U?
150mA null 2.8V positive 5.5V SOT-23-5 Linear Voltage Regulators (LDO) ROHS; Manufacturer: Texas Instruments; Manufacturer Lifecycle Status: ACTIVE; Supplier: DigiKey; Supplier Part Number: 296-51752-1-ND; Manufacturer Part Number: TLV74128PDBVR; RoHS: Compliant; Category: LDO Voltage Regulators; Stock: 8489; Pricing: 1=0.12, 10=0.079, 25=0.0692, 100=0.0583, 250=0.05312, 500=0.05, 1000=0.04741 (USD); Case/Package: SOT-23; Height: 1.45mm; Length: 2.9mm; Lifecycle Status: Production; Max Operating Temperature: 125°C; Min Operating Temperature: -40°C; Pins: 5; Schedule B: 8542390000, 8542390000|8542390000, 8542390000|8542390000|8542390000, 8542390000|8542390000|8542390000|8542390000; Thickness: 1.2mm; Width: 1.6mm; ComponentLink1URL: https://sigma.octopart.com:443/177332311/technical_drawing/Texas-Instruments-TLV74128PDBVR.pdf?src-supplier=Texas+Instruments; ComponentLink1Description: https://sigma.octopart.com:443/177332311/technical_drawing/Texas-Instruments-TLV74128PDBVR.pdf?src-supplier=Texas+Instruments; ComponentLink2URL: https://octopart.com:443/opatz8j6/c1?t=Jij7982ExFCelQgnMgIcz_oOVIBSGhuxNL5XR0gLON9AcVmlENihcu8nCGypNmMKnIgZGgTdLl2tfACsQut9QZzTc7-2i0sYMlE_RZNFCdM5xTDHD-gzgPXVfQisUEavCszK9i6TF020qtVo8jfdJUNpN0WjdxInf68FIKmJPvCFKNQMCvogG-XSDkFTCB6qpBNUZxVG1_k019CGzrsOYQyGU4EBagbE4BSiYeWVsipiBM5PpbF9LZr2M0JW1cx5d4SjJ8Mf9390e5VRZZ7g9K_fOnflhWOh-Aa2b0R-7aWmKJyJDzUBmjo9Q-6fhZRbyx4VJEQwn82KhDNa_XofLbtz8d5kra26Av7rpqkfY3VmDc1pKRmkpzIyF-Lr67lumupeAwk&src-supplier=Texas+Instruments; ComponentLink2Description: https://octopart.com:443/opatz8j6/c1?t=Jij7982ExFCelQgnMgIcz_oOVIBSGhuxNL5XR0gLON9AcVmlENihcu8nCGypNmMKnIgZGgTdLl2tfACsQut9QZzTc7-2i0sYMlE_RZNFCdM5xTDHD-gzgPXVfQisUEavCszK9i6TF020qtVo8jfdJUNpN0WjdxInf68FIKmJPvCFKNQMCvogG-XSDkFTCB6qpBNUZxVG1_k019CGzrsOYQyGU4EBagbE4BSiYeWVsipiBM5PpbF9LZr2M0JW1cx5d4SjJ8Mf9390e5VRZZ7g9K_fOnflhWOh-Aa2b0R-7aWmKJyJDzUBmjo9Q-6fhZRbyx4VJEQwn82KhDNa_XofLbtz8d5kra26Av7rpqkfY3VmDc1pKRmkpzIyF-Lr67lumupeAwk&src-supplier=Texas+Instruments; ComponentLink3URL: https://sigma.octopart.com:443/175570406/technical_drawing/Texas-Instruments-TLV74128PDBVR.pdf?src-supplier=Texas+Instruments; ComponentLink3Description: https://sigma.octopart.com:443/175570406/technical_drawing/Texas-Instruments-TLV74128PDBVR.pdf?src-supplier=Texas+Instruments; ComponentLink4URL: https://sigma.octopart.com:443/169406034/technical_drawing/Texas-Instruments-TLV74128PDBVR.pdf?src-supplier=Texas+Instruments; ComponentLink4Description: https://sigma.octopart.com:443/169406034/technical_drawing/Texas-Instruments-TLV74128PDBVR.pdf?src-supplier=Texas+Instruments; ComponentLink5URL: https://sigma.octopart.com:443/155939316/technical_drawing/Texas-Instruments-TLV74128PDBVR.pdf?src-supplier=Texas+Instruments; ComponentLink5Description: https://sigma.octopart.com:443/155939316/technical_drawing/Texas-Instruments-TLV74128PDBVR.pdf?src-supplier=Texas+Instruments; ComponentLink6URL: https://sigma.octopart.com:443/102331370/technical_drawing/Texas-Instruments-TLV74128PDBVR.pdf?src-supplier=Texas+Instruments; ComponentLink6Description: https://sigma.octopart.com:443/102331370/technical_drawing/Texas-Instruments-TLV74128PDBVR.pdf?src-supplier=Texas+Instruments; ComponentLink7URL: https://sigma.octopart.com:443/49249325/technical_drawing/Texas-Instruments-TLV74128PDBVR.pdf?src-supplier=Texas+Instruments; ComponentLink7Description: https://sigma.octopart.com:443/49249325/technical_drawing/Texas-Instruments-TLV74128PDBVR.pdf?src-supplier=Texas+Instruments; ComponentLink8URL: https://datasheet.octopart.com:443/TLV74128PDBVR-Texas-Instruments-datasheet-159117833.pdf?src-supplier=LCSC; ComponentLink8Description: https://datasheet.octopart.com:443/TLV74128PDBVR-Texas-Instruments-datasheet-159117833.pdf?src-supplier=LCSC; ComponentLink9URL: https://datasheet.octopart.com:443/TLV74128PDBVR-Texas-Instruments-datasheet-148780593.pdf?src-supplier=Augswan; ComponentLink9Description: https://datasheet.octopart.com:443/TLV74128PDBVR-Texas-Instruments-datasheet-148780593.pdf?src-supplier=Augswan; ComponentLink10URL: http://sigma.octopart.com:80/reach_statement/Texas-Instruments-company-64.pdf?src-supplier=Compliance+Statements; ComponentLink10Description: http://sigma.octopart.com:80/reach_statement/Texas-Instruments-company-64.pdf?src-supplier=Compliance+Statements; ComponentLink11URL: http://sigma.octopart.com:80/conflict_mineral_statement/Texas-Instruments-company-63.pdf?src-supplier=Compliance+Statements; ComponentLink11Description: http://sigma.octopart.com:80/conflict_mineral_statement/Texas-Instruments-company-63.pdf?src-supplier=Compliance+Statements; Supplier 1: DigiKey; Supplier Part Number 1: 296-51752-1-ND; Supplier 2: DigiKey; Supplier Part Number 2: 296-51752-2-ND; Supplier 3: Mouser; Supplier Part Number 3: 595-TLV74128PDBVR
footprint SOT95P280X145-5N (SOT23, 5-Leads, Body 2.90x2.80mm, Pitch 0.95mm, IPC Medium Density)
pins: 1 IN, 2 GND, 3 EN, 4 NC, 5 OUT

## TMP118MBIYMSR
designator U?  Manufacturer Part Number: TMP118MBIYMSR  (hidden comment: *)
0.1¡ãC accurate, ultrasmall (0.336mm2) thin (240¦Ìm) I2C digital temperature sensor; Manufacturer: Texas Instruments; Manufacturer Lifecycle Status: ACTIVE; Interface: I2C, SMBus; Supplier: DigiKey; Supplier Part Number: 296-TMP118MBIYMSRCT-ND; RoHS: Compliant; Category: Temperature and Humidity Sensors; Stock: 17618; Pricing: 1=1.13, 5=0.998, 10=0.948, 25=0.8884, 50=0.848, 100=0.8108, 500=0.73622, 1000=0.70849, 5000=0.65269 (USD); Height: 0m; Length: 760µm; Lifecycle Status: Production; Pins: 4; Thickness: 100µm; Width: 760µm; ComponentLink1URL: https://octopart.com:443/opatz8j6/c1?t=Khy7FrBwm6YTBViIx7Qg6EqMp-uAG7rt8yAuBBT5ccPcMhQCegr8Y7d4mEWjDyvTro9ZqfSXpgVg0LBg6xM_oGkkgXs7n2G7LzjvE6SohQCElb-B7FKgkiqIC2WwwLHe95wvcziY5mSpyXwZH0By_qkIKgO8Qp9ic3cP-Tbc70QiT7j7QqvcgJdqyaPnkwvEp3R-zv4vjHDahrWSZqele5I8hLDh1Z5_AZEhfHT_n2mG9eVczB9Uy-qEe7IgMahPBHwVUmHBggE0kk_Dd7rOJ7uZ7QI_ks9ejWgSOb6-5gEVPjrDyB9o7aQw3G_1tQ50frusDngPFzk7X29GC22zWGBSAaBSQg6976yuyZo9cYjmoqrkTrg3Rd5dEG5V4_5FSWJtRw&src-supplier=Texas+Instruments; ComponentLink1Description: https://octopart.com:443/opatz8j6/c1?t=Khy7FrBwm6YTBViIx7Qg6EqMp-uAG7rt8yAuBBT5ccPcMhQCegr8Y7d4mEWjDyvTro9ZqfSXpgVg0LBg6xM_oGkkgXs7n2G7LzjvE6SohQCElb-B7FKgkiqIC2WwwLHe95wvcziY5mSpyXwZH0By_qkIKgO8Qp9ic3cP-Tbc70QiT7j7QqvcgJdqyaPnkwvEp3R-zv4vjHDahrWSZqele5I8hLDh1Z5_AZEhfHT_n2mG9eVczB9Uy-qEe7IgMahPBHwVUmHBggE0kk_Dd7rOJ7uZ7QI_ks9ejWgSOb6-5gEVPjrDyB9o7aQw3G_1tQ50frusDngPFzk7X29GC22zWGBSAaBSQg6976yuyZo9cYjmoqrkTrg3Rd5dEG5V4_5FSWJtRw&src-supplier=Texas+Instruments; ComponentLink2URL: https://datasheet.octopart.com:443/TMP118MBIYMSR-Texas-Instruments-datasheet-190364754.pdf?src-supplier=LCSC; ComponentLink2Description: https://datasheet.octopart.com:443/TMP118MBIYMSR-Texas-Instruments-datasheet-190364754.pdf?src-supplier=LCSC; ComponentLink3URL: http://sigma.octopart.com:80/reach_statement/Texas-Instruments-company-64.pdf?src-supplier=Compliance+Statements; ComponentLink3Description: http://sigma.octopart.com:80/reach_statement/Texas-Instruments-company-64.pdf?src-supplier=Compliance+Statements; ComponentLink4URL: http://sigma.octopart.com:80/conflict_mineral_statement/Texas-Instruments-company-63.pdf?src-supplier=Compliance+Statements; ComponentLink4Description: http://sigma.octopart.com:80/conflict_mineral_statement/Texas-Instruments-company-63.pdf?src-supplier=Compliance+Statements
pins: A1 VDD, A2 GND, B1 SDA, B2 SCL

## TMP139AIYAHR
designator U?
JEDEC DDR5 temperature sensor with 0.5 <strong>&deg;</strong>C accuracy 6-DSBGA -40 to 125; Manufacturer_Name: Texas Instruments; TYPE: TYPE; RefDes: RefDes; Copyright: Copyright (C) 2026 Ultra Librarian. All rights reserved.; Manufacturer_Part_Number: TMP139AIYAHR; Datasheet: https://www.ti.com/lit/gpn/tmp139; Supplier 1: DigiKey; Supplier Part Number 1: 296-TMP139AIYAHRTR-ND; Supplier 2: Mouser; Supplier Part Number 2: 595-TMP139AIYAHR
footprint YAH0006-IPC_A
footprint TMP139AIYAHR (BGA, 6-Leads, Body 0,83x1,33mmx0,40mm, Pitch 0,50mm)
pins: 1 SCL (in), 2 VDDIO (power), 3 SDA (io), 4 SA, 5 VSS (power), 6 VDDSPD (power)

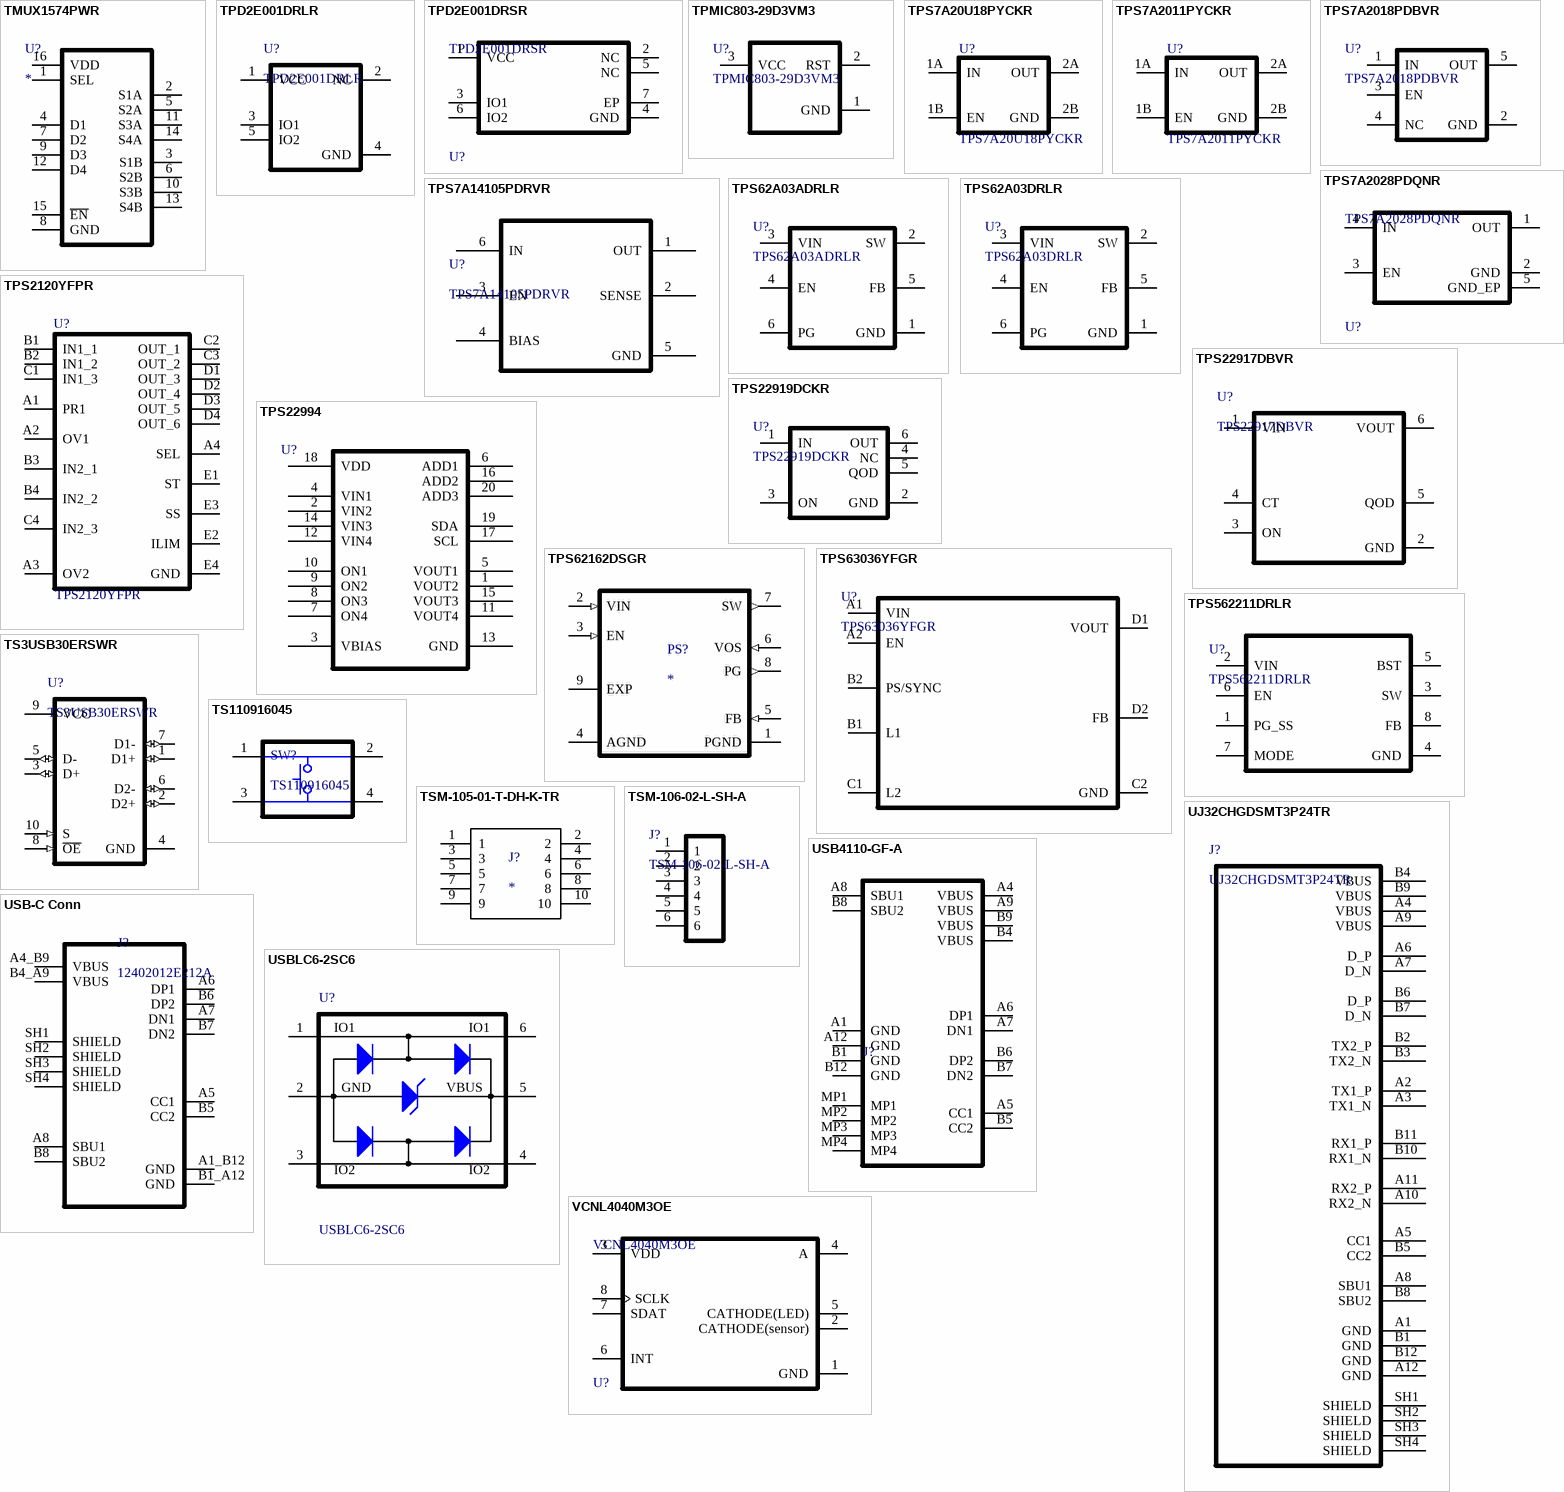
[diagram p16: symbols TMUX1574PWR to VCNL4040M3OE]

## TMUX1574PWR
designator U?
4 Circuit IC Switch 2:1 4.5Ohm 16-TSSOP; Manufacture 1: Texas Instruments; Manufacturer Part Number 1: TMUX1574PWR; Datasheet: http://www.ti.com/lit/ds/symlink/tmux1574.pdf; Height: 1.2mm; Supplier Part Number 1: 296-53444-2-ND; Supplier 1: DigiKey; Supplier Link 1: https://www.digikey.com/en/products/detail/texas-instruments/TMUX1574PWR/9954224; Supplier Unit Price 1: 0.59
footprint SOP65P640X120-16N
pins: 1 SEL, 2 S1A, 3 S1B, 4 D1, 5 S2A, 6 S2B, 7 D2, 8 GND, 9 D3, 10 S3B, 11 S3A, 12 D4, 13 S4B, 14 S4A, 15 ~{EN}, 16 VDD

## TPD2E001DRLR
designator U?
11V Unidirectional 5.5V SOT-553-5 ESD and Surge Protection (TVS/ESD) ROHS; Manufacturer: Texas Instruments; Manufacturer Lifecycle Status: ACTIVE; Value: 1.5pF; Clamping Voltage: 105.5V; Element Configuration: Dual; Interface: Ethernet, LVDS; Leakage Current: 1nA; Max Junction Temperature (Tj): 150°C; Min Supply Voltage: 900mV; Number of Bidirectional Channels: 2; Peak Pulse Current: 10A; Power Line Protection: Yes; Supplier: DigiKey; Supplier Part Number: 296-21883-1-ND; Manufacturer Part Number: TPD2E001DRLR; RoHS: Compliant; Category: ESD and Circuit Protection ICs; Stock: 62032; Pricing: 1=0.82, 10=0.509, 100=0.3282, 500=0.25084 (USD); Ambient Temperature Range High: 85°C; Breakdown Voltage: 11V; Case/Package: SOT; Contact Plating: Gold; Depth: 1.2mm; Direction: Unidirectional; Height: 0m; Lead Free: Lead Free; Length: 1.6mm; Lifecycle Status: Production; Max Operating Temperature: 85°C; Max Supply Voltage: 5.5V; Min Breakdown Voltage: 11V; Min Operating Temperature: -40°C; Number of Channels: 2; Number of Outputs: 2; Pins: 5; Operating Supply Voltage: 5.5V; Polarity: Unidirectional; Radiation Hardening: No; REACH SVHC: No; Reverse Standoff Voltage: 5.5V; Schedule B: 8541100080, 8541100080|8541100080|8541100080|8541100080|8541100080; Termination: SMD/SMT; Thickness: 550µm; Weight: 2.806603mg; Width: 1.2mm; Working Voltage: 5.5V; ComponentLink1URL: https://sigma.octopart.com:443/181443230/technical_drawing/Texas-Instruments-TPD2E001DRLR.pdf?src-supplier=Texas+Instruments; ComponentLink1Description: https://sigma.octopart.com:443/181443230/technical_drawing/Texas-Instruments-TPD2E001DRLR.pdf?src-supplier=Texas+Instruments; ComponentLink2URL: https://octopart.com:443/opatz8j6/c1?t=ItN28SACpDNaP6HBEQm9Q6iVIt4oOF6YLOgBzZeCiwvEW_v_QYTPutJK6__fWoeZM6G1DT60v_-IXP3JVS72uhxnvMguCGn0racWgVh19esynQfxpf5CW46pUG8JqQgukkt0l9b7eU5rTdf3HZ9YTrXIQjvngXBJISGPvf5LDykmGeZY8JDCz6c34SOZDGLUAdR9u3P677q11hspcTMPA8V2BRW-96r2HZo9LIJ4kVXkF5gZM-P0We6u1Y09VRxHq3vMVBBIw3CeaSPqRMKkazsV-sR2O3CLBIcnSg1r3kpnOgOkzEwlpSKtKyCHkhrsnFvYWWDBXsu8y-NBJaecBt5UAxoCQh_XzledbSTpShL4tHLtn6Ps0GNSKtwQ-OvKN5bUmfA&src-supplier=Texas+Instruments; ComponentLink2Description: https://octopart.com:443/opatz8j6/c1?t=ItN28SACpDNaP6HBEQm9Q6iVIt4oOF6YLOgBzZeCiwvEW_v_QYTPutJK6__fWoeZM6G1DT60v_-IXP3JVS72uhxnvMguCGn0racWgVh19esynQfxpf5CW46pUG8JqQgukkt0l9b7eU5rTdf3HZ9YTrXIQjvngXBJISGPvf5LDykmGeZY8JDCz6c34SOZDGLUAdR9u3P677q11hspcTMPA8V2BRW-96r2HZo9LIJ4kVXkF5gZM-P0We6u1Y09VRxHq3vMVBBIw3CeaSPqRMKkazsV-sR2O3CLBIcnSg1r3kpnOgOkzEwlpSKtKyCHkhrsnFvYWWDBXsu8y-NBJaecBt5UAxoCQh_XzledbSTpShL4tHLtn6Ps0GNSKtwQ-OvKN5bUmfA&src-supplier=Texas+Instruments; ComponentLink3URL: https://datasheet.octopart.com:443/TPD2E001DRLR-Texas-Instruments-datasheet-37738713.pdf?src-supplier=Texas+Instruments; ComponentLink3Description: https://datasheet.octopart.com:443/TPD2E001DRLR-Texas-Instruments-datasheet-37738713.pdf?src-supplier=Texas+Instruments; ComponentLink4URL: https://sigma.octopart.com:443/178868977/technical_drawing/Texas-Instruments-TPD2E001DRLR.pdf?src-supplier=Texas+Instruments; ComponentLink4Description: https://sigma.octopart.com:443/178868977/technical_drawing/Texas-Instruments-TPD2E001DRLR.pdf?src-supplier=Texas+Instruments; ComponentLink5URL: https://sigma.octopart.com:443/149978402/technical_drawing/Texas-Instruments-TPD2E001DRLR.pdf?src-supplier=Texas+Instruments; ComponentLink5Description: https://sigma.octopart.com:443/149978402/technical_drawing/Texas-Instruments-TPD2E001DRLR.pdf?src-supplier=Texas+Instruments; ComponentLink6URL: https://datasheet.octopart.com:443/TPD2E001DRLR-Texas-Instruments-datasheet-21096186.pdf?src-supplier=Texas+Instruments; ComponentLink6Description: https://datasheet.octopart.com:443/TPD2E001DRLR-Texas-Instruments-datasheet-21096186.pdf?src-supplier=Texas+Instruments; ComponentLink7URL: https://datasheet.octopart.com:443/TPD2E001DRLR-Texas-Instruments-datasheet-10824604.pdf?src-supplier=Texas+Instruments; ComponentLink7Description: https://datasheet.octopart.com:443/TPD2E001DRLR-Texas-Instruments-datasheet-10824604.pdf?src-supplier=Texas+Instruments; ComponentLink8URL: https://datasheet.octopart.com:443/TPD2E001DRLR-Texas-Instruments-datasheet-10670688.pdf?src-supplier=Texas+Instruments; ComponentLink8Description: https://datasheet.octopart.com:443/TPD2E001DRLR-Texas-Instruments-datasheet-10670688.pdf?src-supplier=Texas+Instruments; ComponentLink9URL: https://datasheet.octopart.com:443/TPD2E001DRLR-Texas-Instruments-datasheet-10258578.pdf?src-supplier=Texas+Instruments; ComponentLink9Description: https://datasheet.octopart.com:443/TPD2E001DRLR-Texas-Instruments-datasheet-10258578.pdf?src-supplier=Texas+Instruments; ComponentLink10URL: https://datasheet.octopart.com:443/TPD2E001DRLR-Texas-Instruments-datasheet-153022.pdf?src-supplier=Texas+Instruments; ComponentLink10Description: https://datasheet.octopart.com:443/TPD2E001DRLR-Texas-Instruments-datasheet-153022.pdf?src-supplier=Texas+Instruments; ComponentLink11URL: https://sigma.octopart.com:443/49249896/technical_drawing/Texas-Instruments-TPD2E001DRLR.pdf?src-supplier=Texas+Instruments; ComponentLink11Description: https://sigma.octopart.com:443/49249896/technical_drawing/Texas-Instruments-TPD2E001DRLR.pdf?src-supplier=Texas+Instruments; ComponentLink12URL: https://datasheet.octopart.com:443/TPD2E001DRLR-Texas-Instruments-datasheet-32015767.pdf?src-supplier=Farnell; ComponentLink12Description: https://datasheet.octopart.com:443/TPD2E001DRLR-Texas-Instruments-datasheet-32015767.pdf?src-supplier=Farnell; ComponentLink13URL: https://datasheet.octopart.com:443/TPD2E001DRLR-Texas-Instruments-datasheet-12491271.pdf?src-supplier=Farnell; ComponentLink13Description: https://datasheet.octopart.com:443/TPD2E001DRLR-Texas-Instruments-datasheet-12491271.pdf?src-supplier=Farnell; ComponentLink14URL: https://datasheet.octopart.com:443/TPD2E001DRLR-Texas-Instruments-datasheet-66807720.pdf?src-supplier=Farnell; ComponentLink14Description: https://datasheet.octopart.com:443/TPD2E001DRLR-Texas-Instruments-datasheet-66807720.pdf?src-supplier=Farnell; ComponentLink15URL: https://datasheet.octopart.com:443/TPD2E001DRLR-Texas-Instruments-datasheet-24570227.pdf?src-supplier=Farnell; ComponentLink15Description: https://datasheet.octopart.com:443/TPD2E001DRLR-Texas-Instruments-datasheet-24570227.pdf?src-supplier=Farnell; ComponentLink16URL: https://datasheet.octopart.com:443/TPD2E001DRLR-Texas-Instruments-datasheet-16079961.pdf?src-supplier=Newark; ComponentLink16Description: https://datasheet.octopart.com:443/TPD2E001DRLR-Texas-Instruments-datasheet-16079961.pdf?src-supplier=Newark; ComponentLink17URL: https://datasheet.octopart.com:443/TPD2E001DRLR-Texas-Instruments-datasheet-159117907.pdf?src-supplier=LCSC; ComponentLink17Description: https://datasheet.octopart.com:443/TPD2E001DRLR-Texas-Instruments-datasheet-159117907.pdf?src-supplier=LCSC; ComponentLink18URL: https://datasheet.octopart.com:443/TPD2E001DRLR-Texas-Instruments-datasheet-137316104.pdf?src-supplier=Future+Electronics; ComponentLink18Description: https://datasheet.octopart.com:443/TPD2E001DRLR-Texas-Instruments-datasheet-137316104.pdf?src-supplier=Future+Electronics; ComponentLink19URL: https://datasheet.octopart.com:443/TPD2E001DRLR-Texas-Instruments-datasheet-14047829.pdf?src-supplier=iiiC; ComponentLink19Description: https://datasheet.octopart.com:443/TPD2E001DRLR-Texas-Instruments-datasheet-14047829.pdf?src-supplier=iiiC; ComponentLink20URL: http://sigma.octopart.com:80/reach_statement/Texas-Instruments-company-64.pdf?src-supplier=Compliance+Statements; ComponentLink20Description: http://sigma.octopart.com:80/reach_statement/Texas-Instruments-company-64.pdf?src-supplier=Compliance+Statements; ComponentLink21URL: http://sigma.octopart.com:80/conflict_mineral_statement/Texas-Instruments-company-63.pdf?src-supplier=Compliance+Statements; ComponentLink21Description: http://sigma.octopart.com:80/conflict_mineral_statement/Texas-Instruments-company-63.pdf?src-supplier=Compliance+Statements; Supplier 1: DigiKey; Supplier Part Number 1: 296-21883-1-ND; Supplier 2: DigiKey; Supplier Part Number 2: 296-21883-2-ND; Supplier 3: Mouser; Supplier Part Number 3: 595-TPD2E001DRLR
footprint SOTFL50P160X60-5N (SOTFL, 5-Leads, Body 1.60x1.60mm, Pitch 0.50mm, IPC Medium Density)
pins: 1 VCC (power) "Power-supply input. Bypass VCC to GND with a 0.1-uF ceramic capacitor.", 2 NC "No connection. Not internally connected.", 3 IO1 "ESD-protected channel", 4 GND (power) "Ground", 5 IO2 "ESD-protected channel"